# Altium footprint library DSC1001CI50080000.PcbLib: 1 footprints
Each footprint in its own frame and in the unit in brackets; x right, y up, seen from the top. Pads: shape width x height; smd on the part's side, far side on the other; paste and mask are expansions set on the pad; w line width, h text height; cw(c..) or ccw(c..) is an arc to the next point about the centre after c.
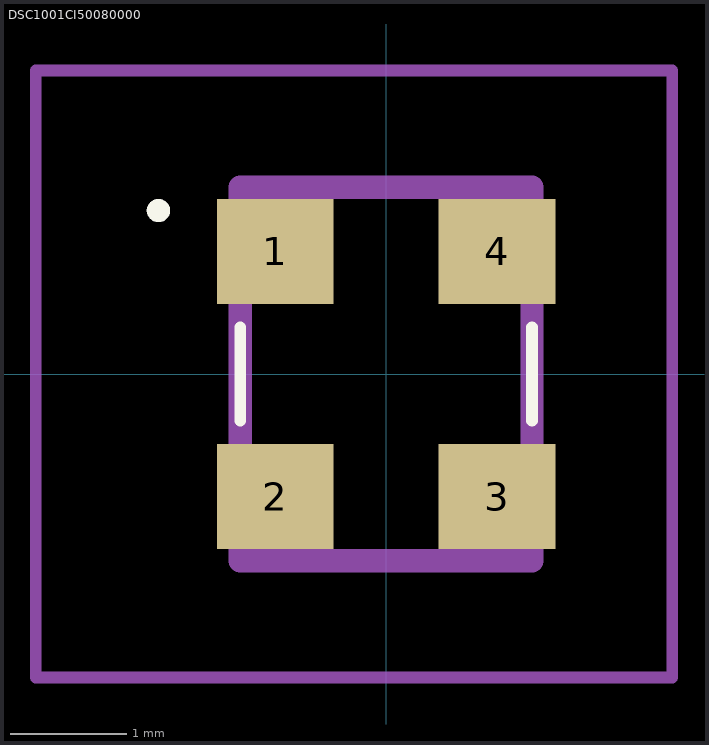
[diagram p0: the footprint, top view; thin cyan lines are the x and y axes]

## DSC1001CI50080000 [mm]
pads (4):
  rect 1x0.9 smd: 1(-0.95,1.05) 2(-0.95,-1.05) 3(0.95,-1.05) 4(0.95,1.05)
Top Overlay:
  lines w0.1: -1.25,-0.4 -1.25,0.4 ; 1.25,-0.4 1.25,0.4 ; -2,1.4 -2,1.4 ; -2,1.4 ccw(c-1.95,1.4) -1.9,1.4 ; -2,1.4 cw(c-1.95,1.4) -1.9,1.4 ; -1.9,1.4 -1.9,1.4
Mechanical 15:
  lines w0.2: -1.25,-1.6 1.25,-1.6 1.25,1.6 -1.25,1.6 -1.25,-1.6
Mechanical 20:
  lines w0.1: -3,-2.6 2.45,-2.6 ; -3,-2.6 -3,2.6 ; -3,-2.6 2.45,-2.6 ; -3,-2.6 -3,2.6 ; -3,2.6 2.45,2.6 ; -3,2.6 2.45,2.6 ; 2.45,-2.6 2.45,2.6 ; 2.45,-2.6 2.45,2.6